# Altium footprint library WR-DSUB.PcbLib: 64 footprints (part 1 of 4)
Each footprint in its own frame and in the unit in brackets; x right, y up, seen from the top. Pads: shape width x height; smd on the part's side, far side on the other; paste and mask are expansions set on the pad; w line width, h text height; cw(c..) or ccw(c..) is an arc to the next point about the centre after c.
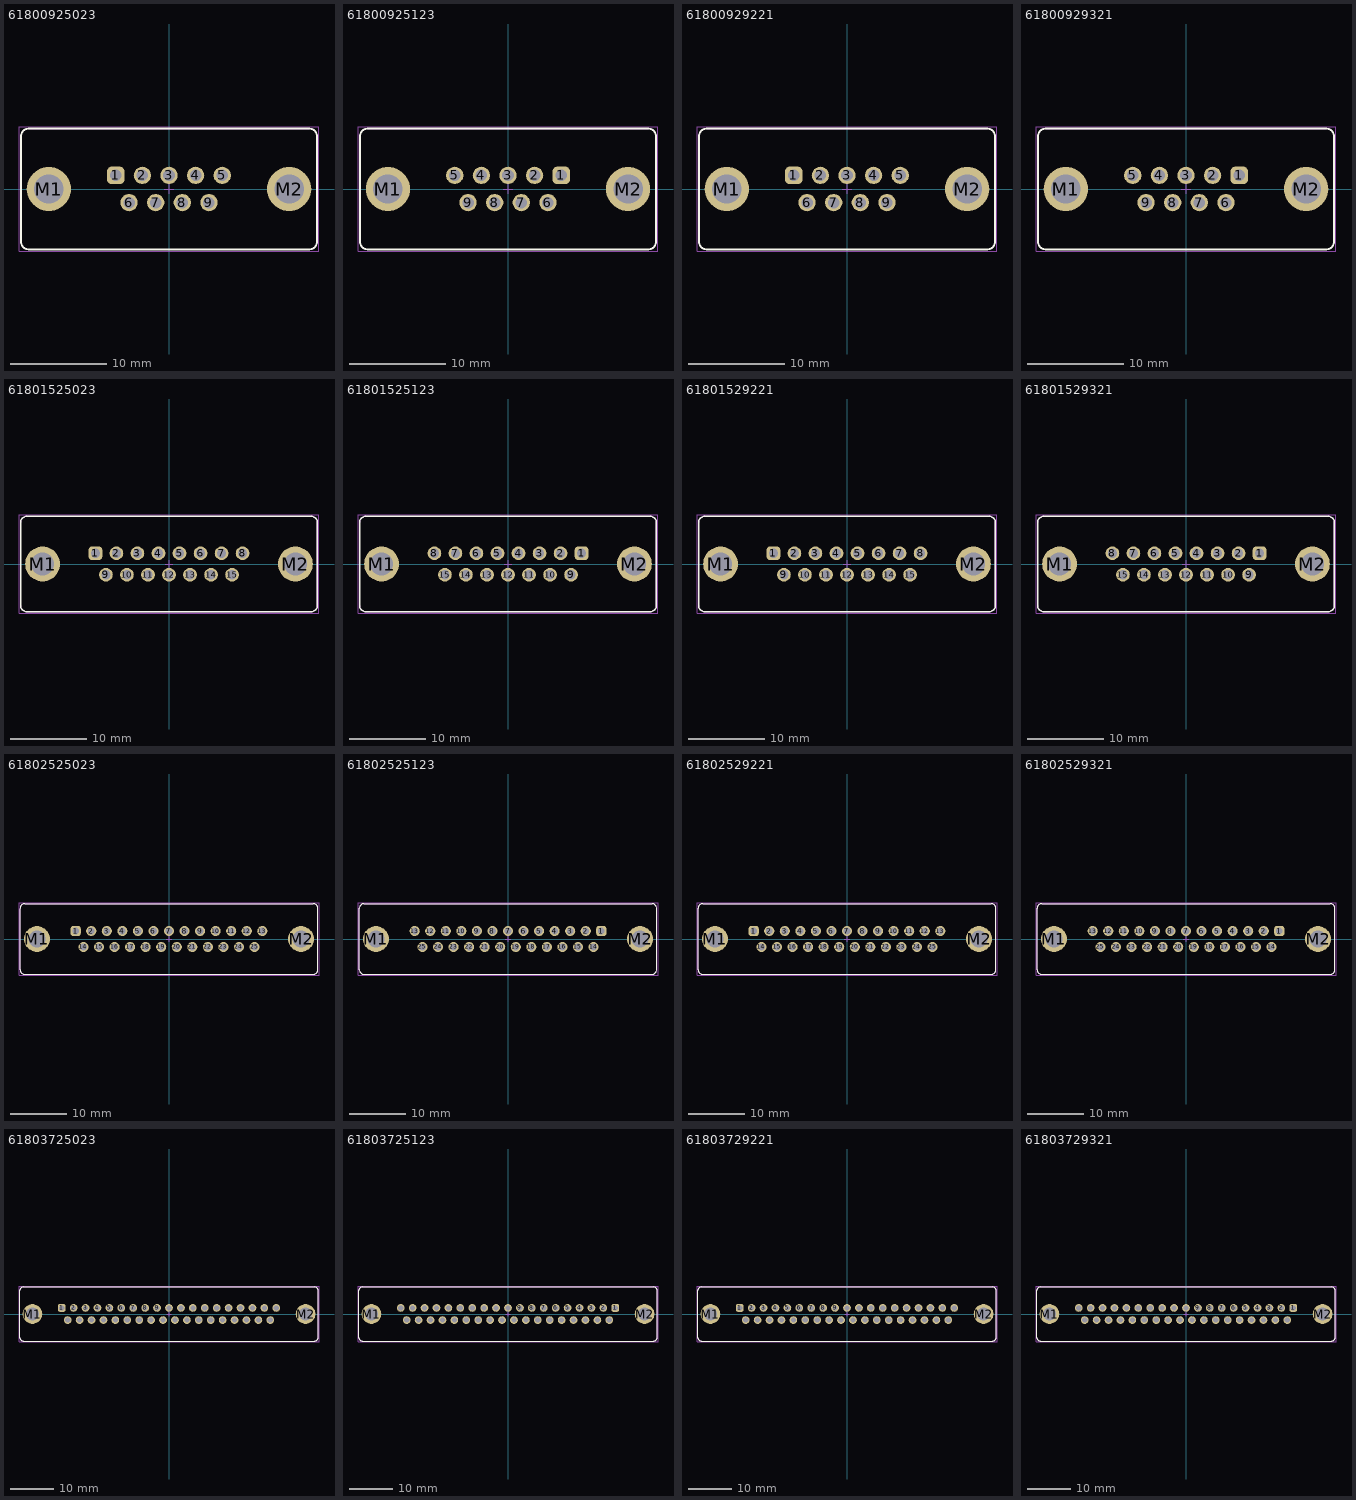
[diagram p0: the footprints below, top view; thin cyan lines are the x and y axes]

## 61800925023 [mm] "9 pins, straight"
height 10.9
pads (11):
  rrect50% 1.8x1.8 hole 1.2: 1(-5.54,1.42)
  round 1.8 hole 1.2: 2(-2.77,1.42) 3(0,1.42) 4(2.77,1.42) 5(5.54,1.42) 6(-4.155,-1.42) 7(-1.385,-1.42) 8(1.385,-1.42) 9(4.155,-1.42)
  round 4.6 hole 3.05: M1(-12.5,0) M2(12.5,0)
Top Overlay:
  lines w0.2: -15.405,-5.475 ccw(c-14.605,-5.475) -14.605,-6.275 14.605,-6.275 ccw(c14.605,-5.475) 15.405,-5.475 15.405,5.475 ccw(c14.605,5.475) 14.605,6.275 -14.605,6.275 ccw(c-14.605,5.475) -15.405,5.475 -15.405,-5.475
Top Assembly:
  lines w0.1: -15.405,-5.475 ccw(c-14.605,-5.475) -14.605,-6.275 14.605,-6.275 ccw(c14.605,-5.475) 15.405,-5.475 15.405,5.475 ccw(c14.605,5.475) 14.605,6.275 -14.605,6.275 ccw(c-14.605,5.475) -15.405,5.475 -15.405,-5.475
Top Designator:
  text ".Designator" at -3.647,-0.357 h1
Top Courtyard:
  lines w0.05: -15.605,-6.475 -15.605,6.475 15.605,6.475 15.605,-6.475 -15.605,-6.475
Top Component Center:
  lines w0.1: -0.5,0 0.5,0 ; 0,-0.5 0,0.5
3D body "61800925023.stp": height 12.2, standoff -4.2, extent -15.4,-6.275 15.4,6.275

## 61800925123 [mm] "9 pins, straight"
height 10.7
pads (11):
  rrect50% 1.8x1.8 hole 1.2: 1(5.54,1.42)
  round 1.8 hole 1.2: 2(2.77,1.42) 3(0,1.42) 4(-2.77,1.42) 5(-5.54,1.42) 6(4.155,-1.42) 7(1.385,-1.42) 8(-1.385,-1.42) 9(-4.155,-1.42)
  round 4.6 hole 3.05: M1(-12.495,0) M2(12.495,0)
Top Overlay:
  lines w0.2: -15.405,5.425 -15.405,-5.475 ccw(c-14.605,-5.475) -14.605,-6.275 14.605,-6.275 ccw(c14.605,-5.475) 15.405,-5.475 15.405,5.425 ; -15.405,5.475 cw(c-14.605,5.475) -14.605,6.275 14.605,6.275 cw(c14.605,5.475) 15.405,5.475
Top Assembly:
  lines w0.1: -15.405,5.425 -15.405,-5.475 ccw(c-14.605,-5.475) -14.605,-6.275 14.605,-6.275 ccw(c14.605,-5.475) 15.405,-5.475 15.405,5.425 ; -15.405,5.475 cw(c-14.605,5.475) -14.605,6.275 14.605,6.275 cw(c14.605,5.475) 15.405,5.475
Top Designator:
  text ".Designator" at -3.647,-0.357 h1
Top Courtyard:
  lines w0.05: -15.605,-6.475 -15.605,6.475 15.605,6.475 15.605,-6.475 -15.605,-6.475
Top Component Center:
  lines w0.1: -0.5,0 0.5,0 ; 0,-0.5 0,0.5
3D body "61800925123.stp": height 11.95, standoff -4.45, extent -15.4,-6.275 15.4,6.275

## 61800929221 [mm] "Male 09p Straight With board clip & Hex screw UNC 4-40"
height 10.9
pads (11):
  rrect50% 1.8x1.8 hole 1.2: 1(-5.54,1.42)
  round 1.8 hole 1.2: 2(-2.77,1.42) 3(0,1.42) 4(2.77,1.42) 5(5.54,1.42) 6(-4.155,-1.42) 7(-1.385,-1.42) 8(1.385,-1.42) 9(4.155,-1.42)
  round 4.6 hole 3.05: M1(-12.5,0) M2(12.5,0)
Top Overlay:
  lines w0.2: -15.405,-5.475 ccw(c-14.605,-5.475) -14.605,-6.275 14.605,-6.275 ccw(c14.605,-5.475) 15.405,-5.475 15.405,5.475 ccw(c14.605,5.475) 14.605,6.275 -14.605,6.275 ccw(c-14.605,5.475) -15.405,5.475 -15.405,-5.475
Top Assembly:
  lines w0.1: -15.405,-5.475 ccw(c-14.605,-5.475) -14.605,-6.275 14.605,-6.275 ccw(c14.605,-5.475) 15.405,-5.475 15.405,5.475 ccw(c14.605,5.475) 14.605,6.275 -14.605,6.275 ccw(c-14.605,5.475) -15.405,5.475 -15.405,-5.475
Top Designator:
  text ".Designator" at -3.647,-0.357 h1
Top Courtyard:
  lines w0.05: -15.605,-6.475 15.605,-6.475 15.605,6.475 -15.605,6.475 -15.605,-6.475
Top Component Center:
  lines w0.1: -0.5,0 0.5,0 ; 0,-0.5 0,0.5
3D body "61800929221.stp": height 12.9, standoff -4.15, extent -15.4,-6.275 15.4,6.275

## 61800929321 [mm] "Female 09p Straight With board clip & Hex screw UNC 4-40"
height 11
pads (11):
  rrect50% 1.8x1.8 hole 1.2: 1(5.54,1.42)
  round 1.8 hole 1.2: 2(2.77,1.42) 3(0,1.42) 4(-2.77,1.42) 5(-5.54,1.42) 6(4.155,-1.42) 7(1.385,-1.42) 8(-1.385,-1.42) 9(-4.155,-1.42)
  round 4.6 hole 3.05: M1(-12.5,0) M2(12.5,0)
Top Overlay:
  lines w0.2: -15.405,-5.475 ccw(c-14.605,-5.475) -14.605,-6.275 14.605,-6.275 ccw(c14.605,-5.475) 15.405,-5.475 15.405,5.475 ccw(c14.605,5.475) 14.605,6.275 -14.605,6.275 ccw(c-14.605,5.475) -15.405,5.475 -15.405,-5.475
Top Assembly:
  lines w0.1: -15.405,-5.475 ccw(c-14.605,-5.475) -14.605,-6.275 14.605,-6.275 ccw(c14.605,-5.475) 15.405,-5.475 15.405,5.475 ccw(c14.605,5.475) 14.605,6.275 -14.605,6.275 ccw(c-14.605,5.475) -15.405,5.475 -15.405,-5.475
Top Designator:
  text ".Designator" at -3.647,-0.357 h1
Top Courtyard:
  lines w0.05: -15.605,-6.475 15.605,-6.475 15.605,6.475 -15.605,6.475 -15.605,-6.475
Top Component Center:
  lines w0.1: -0.5,0 0.5,0 ; 0,-0.5 0,0.5
3D body "61800929321.stp": height 12.65, standoff -4.05, extent -15.4,-6.275 15.4,6.275

## 61801525023 [mm] "15 pins, straight"
height 10.9
pads (17):
  rrect50% 1.8x1.8 hole 1.2: 1(-9.695,1.42)
  round 1.8 hole 1.2: 2(-6.925,1.42) 3(-4.155,1.42) 4(-1.385,1.42) 5(1.385,1.42) 6(4.155,1.42) 7(6.925,1.42) 8(9.695,1.42) 9(-8.31,-1.42) 10(-5.54,-1.42) 11(-2.77,-1.42) 12(0,-1.42) 13(2.77,-1.42) 14(5.54,-1.42) 15(8.31,-1.42)
  round 4.6 hole 3.05: M1(-16.66,0) M2(16.66,0)
Top Overlay:
  lines w0.2: -19.57,-5.475 ccw(c-18.77,-5.475) -18.77,-6.275 18.77,-6.275 ccw(c18.77,-5.475) 19.57,-5.475 19.57,5.475 ccw(c18.77,5.475) 18.77,6.275 -18.77,6.275 ccw(c-18.77,5.475) -19.57,5.475 -19.57,-5.475
Top Assembly:
  lines w0.1: -19.57,-5.475 ccw(c-18.77,-5.475) -18.77,-6.275 18.77,-6.275 ccw(c18.77,-5.475) 19.57,-5.475 19.57,5.475 ccw(c18.77,5.475) 18.77,6.275 -18.77,6.275 ccw(c-18.77,5.475) -19.57,5.475 -19.57,-5.475
Top Designator:
  text ".Designator" at -3.647,-0.357 h1
Top Courtyard:
  lines w0.05: -19.77,-6.475 19.77,-6.475 19.77,6.475 -19.77,6.475 -19.77,-6.475
Top Component Center:
  lines w0.1: -0.5,0 0.5,0 ; 0,-0.5 0,0.5
3D body "61801525023.stp": height 12.2, standoff -4.2, extent -19.6,-6.275 19.6,6.275

## 61801525123 [mm] "15 pins, straight"
height 10.7
pads (17):
  rrect50% 1.8x1.8 hole 1.2: 1(9.695,1.42)
  round 1.8 hole 1.2: 2(6.925,1.42) 3(4.155,1.42) 4(1.385,1.42) 5(-1.385,1.42) 6(-4.155,1.42) 7(-6.925,1.42) 8(-9.695,1.42) 9(8.31,-1.42) 10(5.54,-1.42) 11(2.77,-1.42) 12(0,-1.42) 13(-2.77,-1.42) 14(-5.54,-1.42) 15(-8.31,-1.42)
  round 4.6 hole 3.05: M1(-16.66,0) M2(16.66,0)
Top Overlay:
  lines w0.2: -19.56,5.425 -19.56,-5.475 ccw(c-18.76,-5.475) -18.76,-6.275 18.76,-6.275 ccw(c18.76,-5.475) 19.56,-5.475 19.56,5.425 ; -19.56,5.475 cw(c-18.76,5.475) -18.76,6.275 18.76,6.275 cw(c18.76,5.475) 19.56,5.475
Top Assembly:
  lines w0.1: -19.56,-5.475 ccw(c-18.76,-5.475) -18.76,-6.275 18.76,-6.275 ccw(c18.76,-5.475) 19.56,-5.475 19.56,5.475 ccw(c18.76,5.475) 18.76,6.275 -18.76,6.275 ccw(c-18.76,5.475) -19.56,5.475 -19.56,-5.475
Top Designator:
  text ".Designator" at -3.647,-0.357 h1
Top Courtyard:
  lines w0.05: -19.77,-6.475 -19.77,6.475 19.77,6.475 19.77,-6.475 -19.77,-6.475
Top Component Center:
  lines w0.1: -0.5,0 0.5,0 ; 0,-0.5 0,0.5
3D body "61801525123.stp": height 11.95, standoff -4.45, extent -19.6,-6.275 19.6,6.275

## 61801529221 [mm] "Male 15p Straight With board clip & Hex screw UNC 4-40"
height 10.9
pads (17):
  rrect50% 1.8x1.8 hole 1.2: 1(-9.695,1.42)
  round 1.8 hole 1.2: 2(-6.925,1.42) 3(-4.155,1.42) 4(-1.385,1.42) 5(1.385,1.42) 6(4.155,1.42) 7(6.925,1.42) 8(9.695,1.42) 9(-8.31,-1.42) 10(-5.54,-1.42) 11(-2.77,-1.42) 12(0,-1.42) 13(2.77,-1.42) 14(5.54,-1.42) 15(8.31,-1.42)
  round 4.6 hole 3.05: M1(-16.66,0) M2(16.66,0)
Top Overlay:
  lines w0.2: -19.57,-5.475 ccw(c-18.77,-5.475) -18.77,-6.275 18.77,-6.275 ccw(c18.77,-5.475) 19.57,-5.475 19.57,5.475 ccw(c18.77,5.475) 18.77,6.275 -18.77,6.275 ccw(c-18.77,5.475) -19.57,5.475 -19.57,-5.475
Top Assembly:
  lines w0.1: -19.57,-5.475 ccw(c-18.77,-5.475) -18.77,-6.275 18.77,-6.275 ccw(c18.77,-5.475) 19.57,-5.475 19.57,5.475 ccw(c18.77,5.475) 18.77,6.275 -18.77,6.275 ccw(c-18.77,5.475) -19.57,5.475 -19.57,-5.475
Top Designator:
  text ".Designator" at -3.647,-0.357 h1
Top Courtyard:
  lines w0.05: -19.77,-6.475 19.77,-6.475 19.77,6.475 -19.77,6.475 -19.77,-6.475
Top Component Center:
  lines w0.1: -0.5,0 0.5,0 ; 0,-0.5 0,0.5
3D body "61801529221.stp": height 12.9, standoff -4.15, extent -19.6,-6.275 19.6,6.275

## 61801529321 [mm] "Female 15p Straight With board clip & Hex screw UNC 4-40"
height 11
pads (17):
  rrect50% 1.8x1.8 hole 1.2: 1(9.695,1.42)
  round 1.8 hole 1.2: 2(6.925,1.42) 3(4.155,1.42) 4(1.385,1.42) 5(-1.385,1.42) 6(-4.155,1.42) 7(-6.925,1.42) 8(-9.695,1.42) 9(8.31,-1.42) 10(5.54,-1.42) 11(2.77,-1.42) 12(0,-1.42) 13(-2.77,-1.42) 14(-5.54,-1.42) 15(-8.31,-1.42)
  round 4.6 hole 3.05: M1(-16.66,0) M2(16.66,0)
Top Overlay:
  lines w0.2: -19.57,-5.475 ccw(c-18.77,-5.475) -18.77,-6.275 18.77,-6.275 ccw(c18.77,-5.475) 19.57,-5.475 19.57,5.475 ccw(c18.77,5.475) 18.77,6.275 -18.77,6.275 ccw(c-18.77,5.475) -19.57,5.475 -19.57,-5.475
Top Assembly:
  lines w0.1: -19.57,-5.475 ccw(c-18.77,-5.475) -18.77,-6.275 18.77,-6.275 ccw(c18.77,-5.475) 19.57,-5.475 19.57,5.475 ccw(c18.77,5.475) 18.77,6.275 -18.77,6.275 ccw(c-18.77,5.475) -19.57,5.475 -19.57,-5.475
Top Designator:
  text ".Designator" at -3.647,-0.357 h1
Top Courtyard:
  lines w0.05: -19.77,-6.475 -19.77,6.475 19.77,6.475 19.77,-6.475 -19.77,-6.475
Top Component Center:
  lines w0.1: -0.5,0 0.5,0 ; 0,-0.5 0,0.5
3D body "61801529321.stp": height 12.65, standoff -4.05, extent -19.6,-6.275 19.6,6.275

## 61802525023 [mm] "25 pins, straight"
height 10.9
pads (27):
  rrect50% 1.8x1.8 hole 1.2: 1(-16.62,1.42)
  round 1.8 hole 1.2: 2(-13.85,1.42) 3(-11.08,1.42) 4(-8.31,1.42) 5(-5.54,1.42) 6(-2.77,1.42) 7(0,1.42) 8(2.77,1.42) 9(5.54,1.42) 10(8.31,1.42) 11(11.08,1.42) 12(13.85,1.42) 13(16.62,1.42) 14(-15.235,-1.42) 15(-12.465,-1.42) 16(-9.695,-1.42) 17(-6.925,-1.42) 18(-4.155,-1.42) 19(-1.385,-1.42) 20(1.385,-1.42) 21(4.155,-1.42) 22(6.925,-1.42) 23(9.695,-1.42) 24(12.465,-1.42) 25(15.235,-1.42)
  round 4.6 hole 3.05: M1(-23.52,0) M2(23.52,0)
Top Overlay:
  lines w0.2: -26.52,5.425 -26.52,-5.475 ccw(c-25.72,-5.475) -25.72,-6.275 25.72,-6.275 ccw(c25.72,-5.475) 26.52,-5.475 26.52,5.425 ; -26.52,5.475 cw(c-25.72,5.475) -25.72,6.275 25.72,6.275 cw(c25.72,5.475) 26.52,5.475
Top Assembly:
  lines w0.1: -26.52,5.425 -26.52,-5.475 ccw(c-25.72,-5.475) -25.72,-6.275 25.72,-6.275 ccw(c25.72,-5.475) 26.52,-5.475 26.52,5.425 ; -26.52,5.475 cw(c-25.72,5.475) -25.72,6.275 25.72,6.275 cw(c25.72,5.475) 26.52,5.475
Top Designator:
  text ".Designator" at -3.647,-0.357 h1
Top Courtyard:
  lines w0.05: -26.72,-6.475 26.72,-6.475 26.72,6.475 -26.72,6.475 -26.72,-6.475
Top Component Center:
  lines w0.1: -0.5,0 0.5,0 ; 0,-0.5 0,0.5
3D body "61802525023.stp": height 12.2, standoff -4.2, extent -26.525,-6.275 26.525,6.275

## 61802525123 [mm] "25 pins, straight"
height 10.7
pads (27):
  rrect50% 1.8x1.8 hole 1.2: 1(16.62,1.42)
  round 1.8 hole 1.2: 2(13.85,1.42) 3(11.08,1.42) 4(8.31,1.42) 5(5.54,1.42) 6(2.77,1.42) 7(0,1.42) 8(-2.77,1.42) 9(-5.54,1.42) 10(-8.31,1.42) 11(-11.08,1.42) 12(-13.85,1.42) 13(-16.62,1.42) 14(15.235,-1.42) 15(12.465,-1.42) 16(9.695,-1.42) 17(6.925,-1.42) 18(4.155,-1.42) 19(1.385,-1.42) 20(-1.385,-1.42) 21(-4.155,-1.42) 22(-6.925,-1.42) 23(-9.695,-1.42) 24(-12.465,-1.42) 25(-15.235,-1.42)
  round 4.6 hole 3.05: M1(-23.52,0) M2(23.52,0)
Top Overlay:
  lines w0.2: -26.485,-5.475 ccw(c-25.685,-5.475) -25.685,-6.275 25.685,-6.275 ccw(c25.685,-5.475) 26.485,-5.475 26.485,5.475 ccw(c25.685,5.475) 25.685,6.275 -25.685,6.275 ccw(c-25.685,5.475) -26.485,5.475 -26.485,-5.475
Top Assembly:
  lines w0.1: -26.485,-5.475 ccw(c-25.685,-5.475) -25.685,-6.275 25.685,-6.275 ccw(c25.685,-5.475) 26.485,-5.475 26.485,5.475 ccw(c25.685,5.475) 25.685,6.275 -25.685,6.275 ccw(c-25.685,5.475) -26.485,5.475 -26.485,-5.475
Top Designator:
  text ".Designator" at -3.647,-0.357 h1
Top Courtyard:
  lines w0.05: -26.72,-6.475 -26.72,6.475 26.72,6.475 26.72,-6.475 -26.72,-6.475
Top Component Center:
  lines w0.1: -0.5,0 0.5,0 ; 0,-0.5 0,0.5
3D body "61802525123.stp": height 11.95, standoff -4.45, extent -26.525,-6.275 26.525,6.275

## 61802529221 [mm] "Male 25p Straight With board clip & Hex screw UNC 4-40"
height 10.9
pads (27):
  rrect50% 1.8x1.8 hole 1.2: 1(-16.62,1.42)
  round 1.8 hole 1.2: 2(-13.85,1.42) 3(-11.08,1.42) 4(-8.31,1.42) 5(-5.54,1.42) 6(-2.77,1.42) 7(0,1.42) 8(2.77,1.42) 9(5.54,1.42) 10(8.31,1.42) 11(11.08,1.42) 12(13.85,1.42) 13(16.62,1.42) 14(-15.235,-1.42) 15(-12.465,-1.42) 16(-9.695,-1.42) 17(-6.925,-1.42) 18(-4.155,-1.42) 19(-1.385,-1.42) 20(1.385,-1.42) 21(4.155,-1.42) 22(6.925,-1.42) 23(9.695,-1.42) 24(12.465,-1.42) 25(15.235,-1.42)
  round 4.6 hole 3.05: M1(-23.52,0) M2(23.52,0)
Top Overlay:
  lines w0.2: -26.52,-5.475 ccw(c-25.72,-5.475) -25.72,-6.275 25.72,-6.275 ccw(c25.72,-5.475) 26.52,-5.475 26.52,5.475 ccw(c25.72,5.475) 25.72,6.275 -25.72,6.275 ccw(c-25.72,5.475) -26.52,5.475 -26.52,-5.475
Top Assembly:
  lines w0.1: -26.52,-5.475 ccw(c-25.72,-5.475) -25.72,-6.275 25.72,-6.275 ccw(c25.72,-5.475) 26.52,-5.475 26.52,5.475 ccw(c25.72,5.475) 25.72,6.275 -25.72,6.275 ccw(c-25.72,5.475) -26.52,5.475 -26.52,-5.475
Top Designator:
  text ".Designator" at -3.647,-0.357 h1
Top Courtyard:
  lines w0.05: -26.72,-6.475 26.72,-6.475 26.72,6.475 -26.72,6.475 -26.72,-6.475
Top Component Center:
  lines w0.1: -0.5,0 0.5,0 ; 0,-0.5 0,0.5
3D body "61802529221.stp": height 12.9, standoff -4.15, extent -26.525,-6.275 26.525,6.275

## 61802529321 [mm] "Female 25p Straight With board clip & Hex screw UNC 4-40"
height 11
pads (27):
  rrect50% 1.8x1.8 hole 1.2: 1(16.62,1.42)
  round 1.8 hole 1.2: 2(13.85,1.42) 3(11.08,1.42) 4(8.31,1.42) 5(5.54,1.42) 6(2.77,1.42) 7(0,1.42) 8(-2.77,1.42) 9(-5.54,1.42) 10(-8.31,1.42) 11(-11.08,1.42) 12(-13.85,1.42) 13(-16.62,1.42) 14(15.235,-1.42) 15(12.465,-1.42) 16(9.695,-1.42) 17(6.925,-1.42) 18(4.155,-1.42) 19(1.385,-1.42) 20(-1.385,-1.42) 21(-4.155,-1.42) 22(-6.925,-1.42) 23(-9.695,-1.42) 24(-12.465,-1.42) 25(-15.235,-1.42)
  round 4.6 hole 3.05: M1(-23.52,0) M2(23.52,0)
Top Overlay:
  lines w0.2: -26.52,-5.475 ccw(c-25.72,-5.475) -25.72,-6.275 25.72,-6.275 ccw(c25.72,-5.475) 26.52,-5.475 26.52,5.475 ccw(c25.72,5.475) 25.72,6.275 -25.72,6.275 ccw(c-25.72,5.475) -26.52,5.475 -26.52,-5.475
Top Assembly:
  lines w0.1: -26.52,-5.475 ccw(c-25.72,-5.475) -25.72,-6.275 25.72,-6.275 ccw(c25.72,-5.475) 26.52,-5.475 26.52,5.475 ccw(c25.72,5.475) 25.72,6.275 -25.72,6.275 ccw(c-25.72,5.475) -26.52,5.475 -26.52,-5.475
Top Designator:
  text ".Designator" at -3.647,-0.357 h1
Top Courtyard:
  lines w0.05: -26.72,-6.475 -26.72,6.475 26.72,6.475 26.72,-6.475 -26.72,-6.475
Top Component Center:
  lines w0.1: -0.5,0 0.5,0 ; 0,-0.5 0,0.5
3D body "61802529321.stp": height 12.65, standoff -4.05, extent -26.525,-6.275 26.525,6.275

## 61803725023 [mm] "37 pins, straight"
height 10.9
pads (39):
  rrect50% 1.8x1.8 hole 1.2: 1(-24.93,1.42)
  round 1.8 hole 1.2: 2(-22.16,1.42) 3(-19.39,1.42) 4(-16.62,1.42) 5(-13.85,1.42) 6(-11.08,1.42) 7(-8.31,1.42) 8(-5.54,1.42) 9(-2.77,1.42) 10(0,1.42) 11(2.77,1.42) 12(5.54,1.42) 13(8.31,1.42) 14(11.08,1.42) 15(13.85,1.42) 16(16.62,1.42) 17(19.39,1.42) 18(22.16,1.42) 19(24.93,1.42) 20(-23.545,-1.42) 21(-20.775,-1.42) 22(-18.005,-1.42) 23(-15.235,-1.42) 24(-12.465,-1.42) 25(-9.695,-1.42) 26(-6.925,-1.42) 27(-4.155,-1.42) 28(-1.385,-1.42) 29(1.385,-1.42) 30(4.155,-1.42) 31(6.925,-1.42) 32(9.695,-1.42) 33(12.465,-1.42) 34(15.235,-1.42) 35(18.005,-1.42) 36(20.775,-1.42) 37(23.545,-1.42)
  round 4.6 hole 3.05: M1(-31.75,0) M2(31.75,0)
Top Overlay:
  lines w0.2: -34.66,-5.475 ccw(c-33.86,-5.475) -33.86,-6.275 33.86,-6.275 ccw(c33.86,-5.475) 34.66,-5.475 34.66,5.475 ccw(c33.86,5.475) 33.86,6.275 -33.86,6.275 ccw(c-33.86,5.475) -34.66,5.475 -34.66,-5.475
Top Assembly:
  lines w0.1: -34.66,-5.475 ccw(c-33.86,-5.475) -33.86,-6.275 33.86,-6.275 ccw(c33.86,-5.475) 34.66,-5.475 34.66,5.475 ccw(c33.86,5.475) 33.86,6.275 -33.86,6.275 ccw(c-33.86,5.475) -34.66,5.475 -34.66,-5.475
Top Designator:
  text ".Designator" at -3.647,-0.357 h1
Top Courtyard:
  lines w0.05: -34.86,-6.475 34.86,-6.475 34.86,6.475 -34.86,6.475 -34.86,-6.475
Top Component Center:
  lines w0.1: -0.5,0 0.5,0 ; 0,-0.5 0,0.5
3D body "61803725023.stp": height 12.2, standoff -4.2, extent -34.7,-6.275 34.7,6.275

## 61803725123 [mm] "37 pins, straight"
height 10.7
pads (39):
  rrect50% 1.8x1.8 hole 1.2: 1(24.93,1.42)
  round 1.8 hole 1.2: 2(22.16,1.42) 3(19.39,1.42) 4(16.62,1.42) 5(13.85,1.42) 6(11.08,1.42) 7(8.31,1.42) 8(5.54,1.42) 9(2.77,1.42) 10(0,1.42) 11(-2.77,1.42) 12(-5.54,1.42) 13(-8.31,1.42) 14(-11.08,1.42) 15(-13.85,1.42) 16(-16.62,1.42) 17(-19.39,1.42) 18(-22.16,1.42) 19(-24.93,1.42) 20(23.545,-1.42) 21(20.775,-1.42) 22(18.005,-1.42) 23(15.235,-1.42) 24(12.465,-1.42) 25(9.695,-1.42) 26(6.925,-1.42) 27(4.155,-1.42) 28(1.385,-1.42) 29(-1.385,-1.42) 30(-4.155,-1.42) 31(-6.925,-1.42) 32(-9.695,-1.42) 33(-12.465,-1.42) 34(-15.235,-1.42) 35(-18.005,-1.42) 36(-20.775,-1.42) 37(-23.545,-1.42)
  round 4.6 hole 3.05: M1(-31.75,0) M2(31.75,0)
Top Overlay:
  lines w0.2: -34.66,-5.475 ccw(c-33.86,-5.475) -33.86,-6.275 33.86,-6.275 ccw(c33.86,-5.475) 34.66,-5.475 34.66,5.475 ccw(c33.86,5.475) 33.86,6.275 -33.86,6.275 ccw(c-33.86,5.475) -34.66,5.475 -34.66,-5.475
Top Assembly:
  lines w0.1: -34.66,-5.475 ccw(c-33.86,-5.475) -33.86,-6.275 33.86,-6.275 ccw(c33.86,-5.475) 34.66,-5.475 34.66,5.475 ccw(c33.86,5.475) 33.86,6.275 -33.86,6.275 ccw(c-33.86,5.475) -34.66,5.475 -34.66,-5.475
Top Designator:
  text ".Designator" at -3.647,-0.357 h1
Top Courtyard:
  lines w0.05: -34.86,-6.475 -34.86,6.475 34.86,6.475 34.86,-6.475 -34.86,-6.475
Top Component Center:
  lines w0.1: -0.5,0 0.5,0 ; 0,-0.5 0,0.5
3D body "61803725123.stp": height 11.95, standoff -4.45, extent -34.7,-6.275 34.7,6.275

## 61803729221 [mm] "Male 37p Straight With board clip & Hex screw UNC 4-40"
height 10.9
pads (39):
  rrect50% 1.8x1.8 hole 1.2: 1(-24.93,1.42)
  round 1.8 hole 1.2: 2(-22.16,1.42) 3(-19.39,1.42) 4(-16.62,1.42) 5(-13.85,1.42) 6(-11.08,1.42) 7(-8.31,1.42) 8(-5.54,1.42) 9(-2.77,1.42) 10(0,1.42) 11(2.77,1.42) 12(5.54,1.42) 13(8.31,1.42) 14(11.08,1.42) 15(13.85,1.42) 16(16.62,1.42) 17(19.39,1.42) 18(22.16,1.42) 19(24.93,1.42) 20(-23.545,-1.42) 21(-20.775,-1.42) 22(-18.005,-1.42) 23(-15.235,-1.42) 24(-12.465,-1.42) 25(-9.695,-1.42) 26(-6.925,-1.42) 27(-4.155,-1.42) 28(-1.385,-1.42) 29(1.385,-1.42) 30(4.155,-1.42) 31(6.925,-1.42) 32(9.695,-1.42) 33(12.465,-1.42) 34(15.235,-1.42) 35(18.005,-1.42) 36(20.775,-1.42) 37(23.545,-1.42)
  round 4.6 hole 3.05: M1(-31.75,0) M2(31.75,0)
Top Overlay:
  lines w0.2: -34.66,-5.475 ccw(c-33.86,-5.475) -33.86,-6.275 33.86,-6.275 ccw(c33.86,-5.475) 34.66,-5.475 34.66,5.475 ccw(c33.86,5.475) 33.86,6.275 -33.86,6.275 ccw(c-33.86,5.475) -34.66,5.475 -34.66,-5.475
Top Assembly:
  lines w0.1: -34.66,-5.475 ccw(c-33.86,-5.475) -33.86,-6.275 33.86,-6.275 ccw(c33.86,-5.475) 34.66,-5.475 34.66,5.475 ccw(c33.86,5.475) 33.86,6.275 -33.86,6.275 ccw(c-33.86,5.475) -34.66,5.475 -34.66,-5.475
Top Designator:
  text ".Designator" at -3.647,-0.357 h1
Top Courtyard:
  lines w0.05: -34.86,-6.475 34.86,-6.475 34.86,6.475 -34.86,6.475 -34.86,-6.475
Top Component Center:
  lines w0.1: -0.5,0 0.5,0 ; 0,-0.5 0,0.5
3D body "61803729221.stp": height 12.9, standoff -4.15, extent -34.7,-6.275 34.7,6.275

## 61803729321 [mm] "Female 37p Straight With board clip & Hex screw UNC 4-40"
height 11
pads (39):
  rrect50% 1.8x1.8 hole 1.2: 1(24.93,1.42)
  round 1.8 hole 1.2: 2(22.16,1.42) 3(19.39,1.42) 4(16.62,1.42) 5(13.85,1.42) 6(11.08,1.42) 7(8.31,1.42) 8(5.54,1.42) 9(2.77,1.42) 10(0,1.42) 11(-2.77,1.42) 12(-5.54,1.42) 13(-8.31,1.42) 14(-11.08,1.42) 15(-13.85,1.42) 16(-16.62,1.42) 17(-19.39,1.42) 18(-22.16,1.42) 19(-24.93,1.42) 20(23.545,-1.42) 21(20.775,-1.42) 22(18.005,-1.42) 23(15.235,-1.42) 24(12.465,-1.42) 25(9.695,-1.42) 26(6.925,-1.42) 27(4.155,-1.42) 28(1.385,-1.42) 29(-1.385,-1.42) 30(-4.155,-1.42) 31(-6.925,-1.42) 32(-9.695,-1.42) 33(-12.465,-1.42) 34(-15.235,-1.42) 35(-18.005,-1.42) 36(-20.775,-1.42) 37(-23.545,-1.42)
  round 4.6 hole 3.05: M1(-31.75,0) M2(31.75,0)
Top Overlay:
  lines w0.2: -34.66,-5.475 ccw(c-33.86,-5.475) -33.86,-6.275 33.86,-6.275 ccw(c33.86,-5.475) 34.66,-5.475 34.66,5.475 ccw(c33.86,5.475) 33.86,6.275 -33.86,6.275 ccw(c-33.86,5.475) -34.66,5.475 -34.66,-5.475
Top Assembly:
  lines w0.1: -34.66,-5.475 ccw(c-33.86,-5.475) -33.86,-6.275 33.86,-6.275 ccw(c33.86,-5.475) 34.66,-5.475 34.66,5.475 ccw(c33.86,5.475) 33.86,6.275 -33.86,6.275 ccw(c-33.86,5.475) -34.66,5.475 -34.66,-5.475
Top Designator:
  text ".Designator" at -3.647,-0.357 h1
Top Courtyard:
  lines w0.05: -34.86,-6.475 -34.86,6.475 34.86,6.475 34.86,-6.475 -34.86,-6.475
Top Component Center:
  lines w0.1: -0.5,0 0.5,0 ; 0,-0.5 0,0.5
3D body "61803729321.stp": height 12.75, standoff -4.1, extent -34.7,-6.275 34.7,6.275